# Altium footprint library shf-110-01-l-d-sm.PcbLib: 1 footprints
Each footprint in its own frame and in the unit in brackets; x right, y up, seen from the top. Pads: shape width x height; smd on the part's side, far side on the other; paste and mask are expansions set on the pad; w line width, h text height; cw(c..) or ccw(c..) is an arc to the next point about the centre after c.
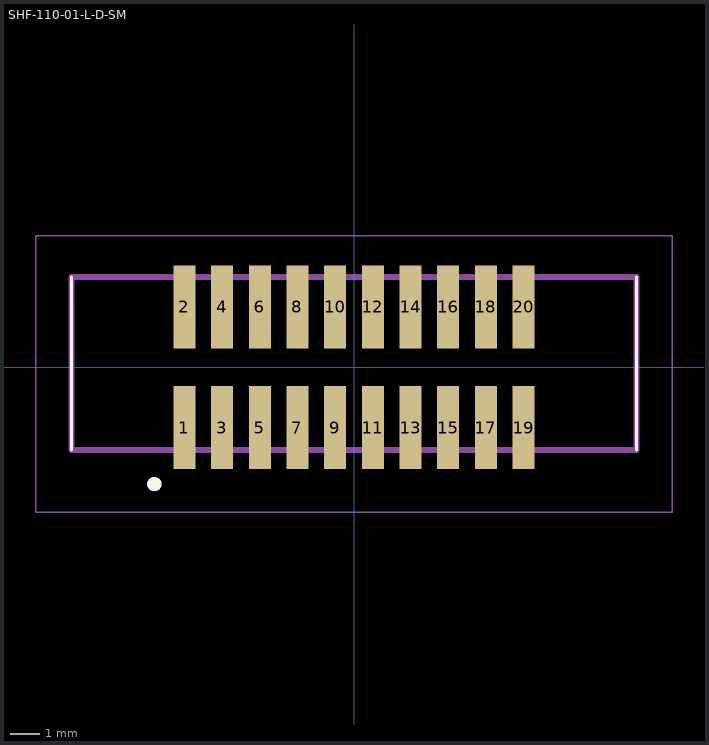
[diagram p0: the footprint, top view; thin cyan lines are the x and y axes]

## SHF-110-01-L-D-SM [mm]
pads (20):
  rect 0.74x2.795 smd: 1(-5.715,-2.033) 2(-5.715,2.033) 3(-4.445,-2.033) 4(-4.445,2.033) 5(-3.175,-2.033) 6(-3.175,2.033) 7(-1.905,-2.033) 8(-1.905,2.033) 9(-0.635,-2.033) 10(-0.635,2.033) 11(0.635,-2.033) 12(0.635,2.033) 13(1.905,-2.033) 14(1.905,2.033) 15(3.175,-2.033) 16(3.175,2.033) 17(4.445,-2.033) 18(4.445,2.033) 19(5.715,-2.033) 20(5.715,2.033)
Top Overlay:
  circle w0.381: c-6.731,-3.937 r0.05
  lines w0.1: -9.525,-2.795 -9.525,3.05 ; 9.525,-2.795 9.525,3.05
Mechanical 13:
  lines w0.2: -9.525,-2.795 9.525,-2.795 9.525,3.05 -9.525,3.05 -9.525,-2.795
Mechanical 15:
  lines w0.05: -10.725,-4.882 10.725,-4.882 10.725,4.43 -10.725,4.43 -10.725,-4.882
3D body "SHF-110-01-L-D-SM.stp": height 5.33, standoff -0.13, extent -9.525,-3.048 9.525,3.048